# Altium footprint library ABM8-12P000MHZ-B2-T.PcbLib: 3 footprints
Each footprint in its own frame and in the unit in brackets; x right, y up, seen from the top. Pads: shape width x height; smd on the part's side, far side on the other; paste and mask are expansions set on the pad; w line width, h text height; cw(c..) or ccw(c..) is an arc to the next point about the centre after c.
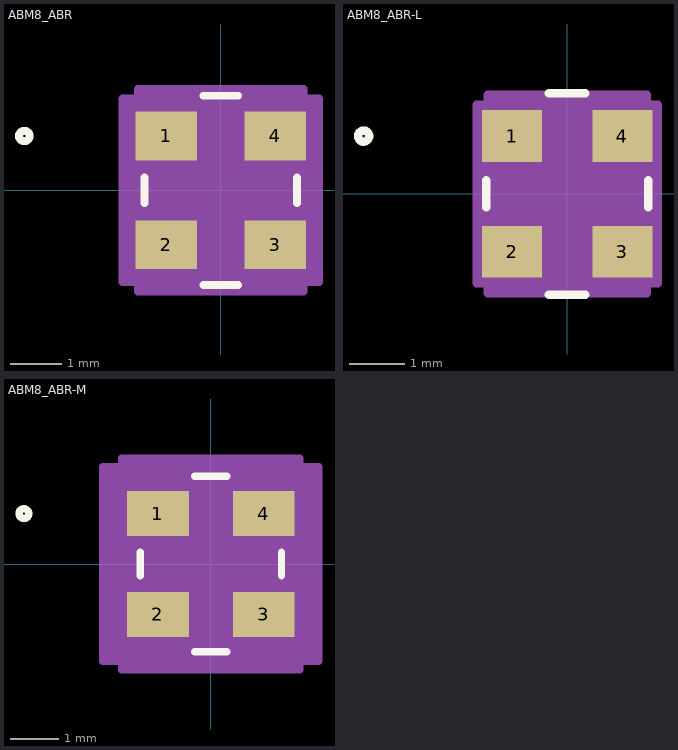
[diagram p0: the footprints below, top view; thin cyan lines are the x and y axes]

## ABM8_ABR [mm]
pads (4):
  rect 1.189x0.941 smd paste+0 mask+0: 1(-1.052,1.05) 2(-1.052,-1.05) 3(1.052,-1.05) 4(1.052,1.05)
Top Overlay:
  circle w0.152: c-3.797,1.05 r0.102
  lines w0.152: -1.473,-0.247 -1.473,0.247 ; -0.333,-1.829 0.333,-1.829 ; -0.333,1.829 0.333,1.829 ; 1.473,-0.247 1.473,0.247
  text ".Designator" at -3.492,-0.635 h1.27
Mechanical 13:
  circle w0.025: c-0.457,1.05 r0.076
  lines w0.025: -0.305,1.702 ccw(c0,1.702) 0.305,1.702 ; -1.346,-1.702 1.346,-1.702 1.346,1.702 -1.346,1.702 -1.346,-1.702
  text ".Designator" at -3.492,-0.635 h1.27
Mechanical 15:
  region: -1.6,-1.774 -1.9,-1.774 -1.9,1.774 -1.6,1.774 -1.6,1.956 1.6,1.956 1.6,1.774 1.9,1.774 1.9,-1.774 1.6,-1.774 1.6,-1.956 -1.6,-1.956
  lines w0.152: -1.9,-1.774 -1.9,1.774 -1.6,1.774 -1.6,1.956 1.6,1.956 1.6,1.774 1.9,1.774 1.9,-1.774 1.6,-1.774 1.6,-1.956 -1.6,-1.956 -1.6,-1.774 -1.9,-1.774
3D body "ABM8_ABR.step": height 0.81, standoff 0, extent -1.346,-1.702 1.346,1.702

## ABM8_ABR-L [mm]
pads (4):
  rect 1.089x0.941 smd paste+0 mask+0: 1(-1.002,1.05) 2(-1.002,-1.05) 3(1.002,-1.05) 4(1.002,1.05)
Top Overlay:
  circle w0.152: c-3.697,1.05 r0.102
  lines w0.152: -1.473,-0.247 -1.473,0.247 ; -0.333,-1.829 0.333,-1.829 ; -0.333,1.829 0.333,1.829 ; 1.473,-0.247 1.473,0.247
  text ".Designator" at -3.492,-0.635 h1.27
Mechanical 13:
  circle w0.025: c-0.457,1.05 r0.076
  lines w0.025: -0.305,1.702 ccw(c0,1.702) 0.305,1.702 ; -1.346,-1.702 1.346,-1.702 1.346,1.702 -1.346,1.702 -1.346,-1.702
  text ".Designator" at -3.492,-0.635 h1.27
Mechanical 15:
  region: -1.448,-1.622 -1.648,-1.622 -1.648,1.622 -1.448,1.622 -1.448,1.803 1.448,1.803 1.448,1.622 1.648,1.622 1.648,-1.622 1.448,-1.622 1.448,-1.803 -1.448,-1.803
  lines w0.152: -1.648,-1.622 -1.648,1.622 -1.448,1.622 -1.448,1.803 1.448,1.803 1.448,1.622 1.648,1.622 1.648,-1.622 1.448,-1.622 1.448,-1.803 -1.448,-1.803 -1.448,-1.622 -1.648,-1.622
3D body "ABM8_ABR.step": height 0.81, standoff 0, extent -1.346,-1.702 1.346,1.702

## ABM8_ABR-M [mm]
pads (4):
  rect 1.289x0.941 smd paste+0 mask+0: 1(-1.102,1.05) 2(-1.102,-1.05) 3(1.102,-1.05) 4(1.102,1.05)
Top Overlay:
  circle w0.152: c-3.897,1.05 r0.102
  lines w0.152: -1.473,-0.247 -1.473,0.247 ; -0.333,-1.829 0.333,-1.829 ; -0.333,1.829 0.333,1.829 ; 1.473,-0.247 1.473,0.247
  text ".Designator" at -3.492,-0.635 h1.27
Mechanical 13:
  circle w0.025: c-0.457,1.05 r0.076
  lines w0.025: -0.305,1.702 ccw(c0,1.702) 0.305,1.702 ; -1.346,-1.702 1.346,-1.702 1.346,1.702 -1.346,1.702 -1.346,-1.702
  text ".Designator" at -3.492,-0.635 h1.27
Mechanical 15:
  region: -1.854,-2.028 -2.254,-2.028 -2.254,2.028 -1.854,2.028 -1.854,2.21 1.854,2.21 1.854,2.028 2.254,2.028 2.254,-2.028 1.854,-2.028 1.854,-2.21 -1.854,-2.21
  lines w0.152: -2.254,-2.028 -2.254,2.028 -1.854,2.028 -1.854,2.21 1.854,2.21 1.854,2.028 2.254,2.028 2.254,-2.028 1.854,-2.028 1.854,-2.21 -1.854,-2.21 -1.854,-2.028 -2.254,-2.028
3D body "ABM8_ABR.step": height 0.81, standoff 0, extent -1.346,-1.702 1.346,1.702